# Altium footprint library Eduard.PcbLib: 54 footprints (part 3 of 4)
Each footprint in its own frame and in the unit in brackets; x right, y up, seen from the top. Pads: shape width x height; smd on the part's side, far side on the other; paste and mask are expansions set on the pad; w line width, h text height; cw(c..) or ccw(c..) is an arc to the next point about the centre after c.
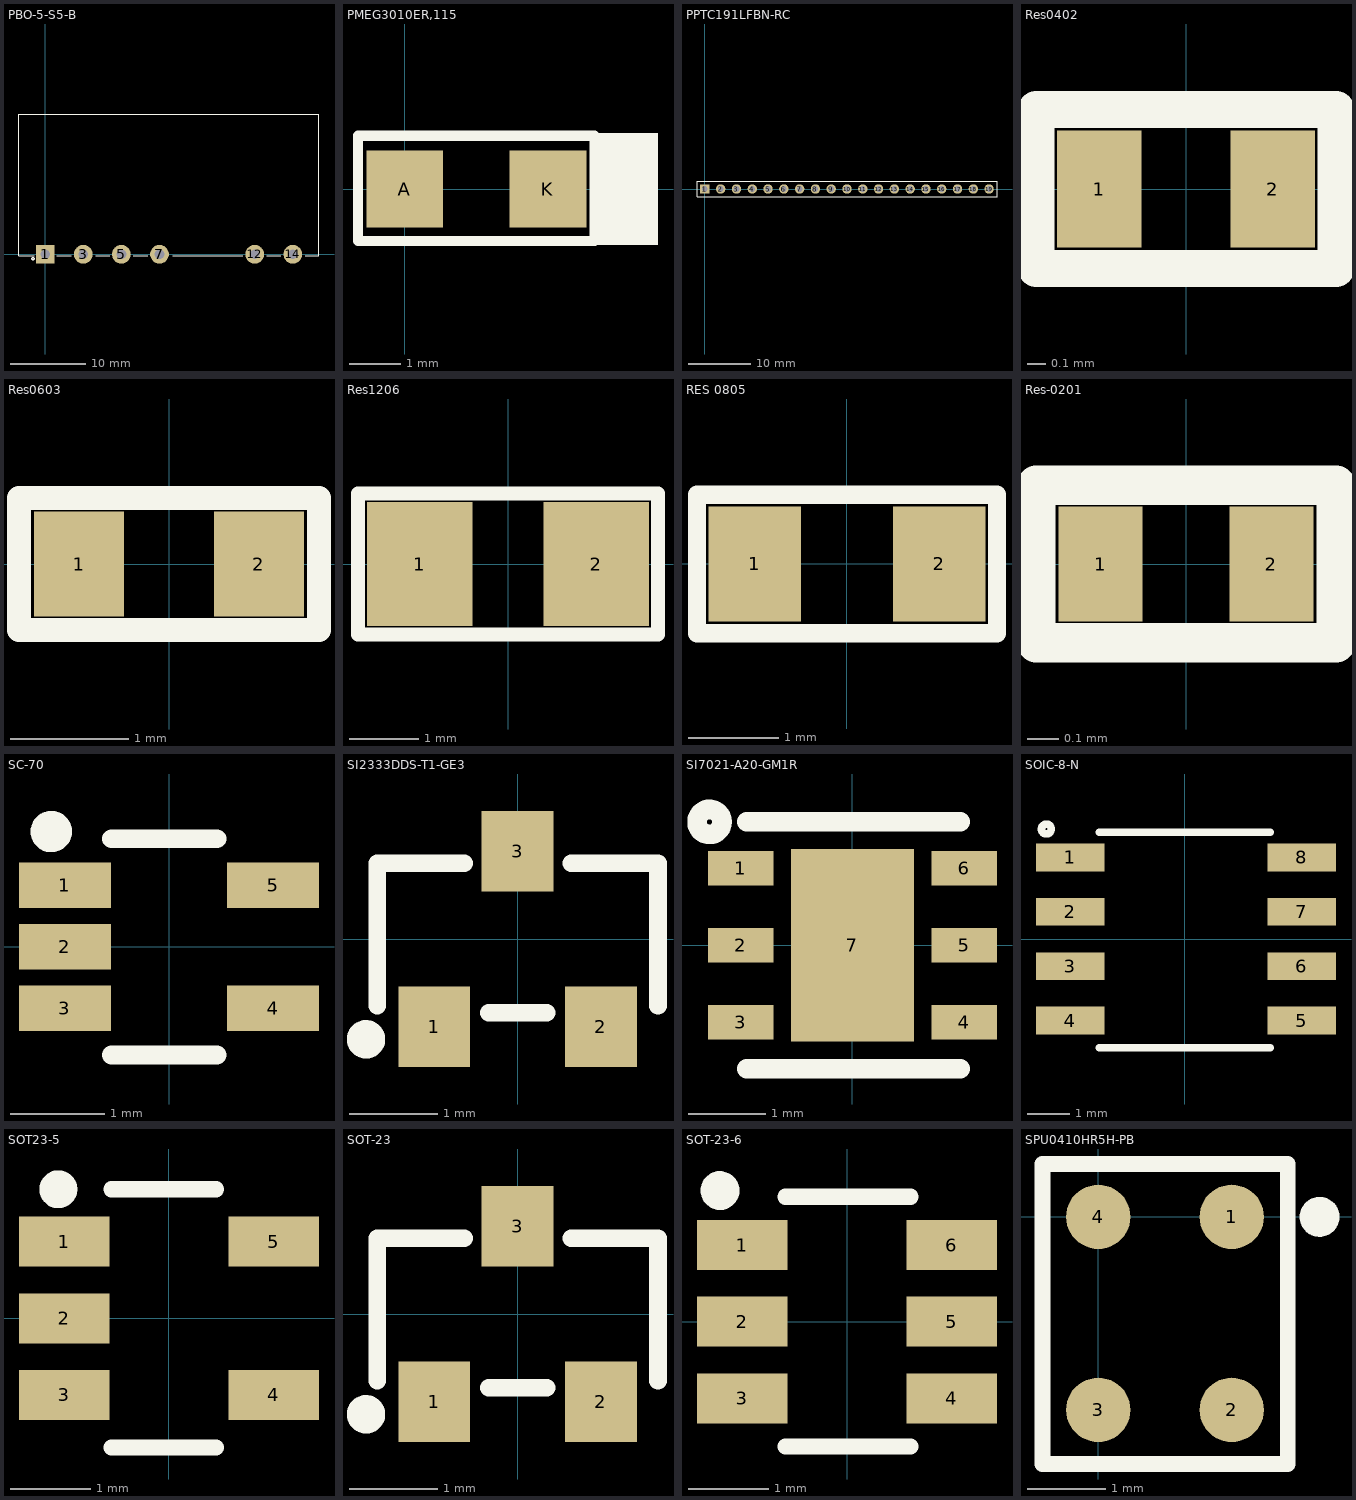
[diagram p2: the footprints below, top view; thin cyan lines are the x and y axes]

## PBO-5-S5-B [mm]
pads (6):
  rect 2.5x2.5 hole 1.3: 1(0,0)
  round 2.5 hole 1.3: 3(5.08,0) 5(10.16,0) 7(15.24,0) 12(27.94,0) 14(33.02,0)
Top Overlay:
  circle w0.2: c-1.626,-0.61 r0.152
  lines w0.127: -1.473,-0.203 -3.49,-0.203 -3.49,18.654 36.51,18.654 36.51,-0.203 34.696,-0.203 ; 1.549,-0.203 3.505,-0.203 ; 6.756,-0.203 8.636,-0.203 ; 11.76,-0.203 13.665,-0.203 ; 16.993,-0.203 26.345,-0.203 ; 29.566,-0.203 31.42,-0.203
3D body "CUI_PBO-5-S5-B.step": height 10.7, standoff -6.35, extent -3.494,-0.187 36.534,18.595

## PMEG3010ER,115 [mm] "DIODE SCHOTTKY 30V 1A SOD123W"
pads (2):
  rect 1.5x1.5 smd: A(0,0) K(2.8,0)
Top Overlay:
  region: 4.953,1.092 3.708,1.092 3.708,-1.092 4.953,-1.092
  lines w0.2: -0.914,-1.016 -0.914,1.041 3.708,1.041 3.708,-1.016 -0.914,-1.016
3D body "User Library-SOD123W.STEP": height 1.1, standoff -0.01, extent -0.603,-0.95 3.397,0.95

## PPTC191LFBN-RC [mm] "Connector Header 19 Position 2.54mm Trough Hole PCB Mount"
pads (19):
  rect 1.5x1.5 hole 0.9: 1(0,0)
  round 1.5 hole 0.9: 2(2.54,0) 3(5.08,0) 4(7.62,0) 5(10.16,0) 6(12.7,0) 7(15.24,0) 8(17.78,0) 9(20.32,0) 10(22.86,0) 11(25.4,0) 12(27.94,0) 13(30.48,0) 14(33.02,0) 15(35.56,0) 16(38.1,0) 17(40.64,0) 18(43.18,0) 19(45.72,0)
Top Overlay:
  lines w0.2: 37.465,1.27 37.677,1.27 ; -1.27,-1.27 46.99,-1.27 46.99,1.27 0.635,1.27 -1.27,1.27 -1.27,-1.27
3D body "female_header_a-bl254-eg-g19d.stp": height 8.5, standoff -3.2, extent -1.395,-1.237 47.115,1.263

## Res0402 [mil]
pads (2):
  rect 18x25 smd mask+4: 1(-18.5,0) 2(18.5,0)
Top Overlay:
  lines w7.87: -32,-17 32,-17 32,17 -32,17 -32,-17
3D body "User Library-RES_1005-0402.step": height 16.14, standoff 0, extent -22.63,-10.82 22.64,10.83

## Res0603 [mil]
pads (2):
  rect 30x35 smd: 1(-30,0) 2(30,0)
Top Overlay:
  lines w7.87: -50,-22 -50,22 50,22 50,-22 -50,-22
3D body "User Library-RESC1608X05N.step": height 17.76, standoff 0, extent -30.52,-16.74 30.51,16.73

## Res1206 [mil]
pads (2):
  rect 60x70 smd: 1(-50,0) 2(50,0)
Top Overlay:
  lines w7.87: -85,-40 85,-40 85,40 -85,40 -85,-40
3D body "User Library-1206 SMD Resistor.step": height 39.45, standoff 0, extent -62.99,-31.49 63,31.51

## RES 0805 [mil] "SMD 0805"
pads (2):
  rect 40x50 smd: 1(-40,0) 2(40,0)
Top Overlay:
  lines w7.87: -65,-30 -65,30 65,30 65,-30 -65,-30
3D body "User Library-CR2012-0805.STEP": height 23.62, standoff 0, extent -39.34,-24.75 39.4,24.46

## Res-0201 [mm]
pads (2):
  rect 0.27x0.37 smd: 1(-0.275,0) 2(0.275,0)
Top Overlay:
  lines w0.127: -0.483,-0.254 0.483,-0.254 0.483,0.254 -0.483,0.254 -0.483,-0.254
3D body "User Library-0201(0603M) Res.step": height 0.29, standoff -0.02, extent -0.305,-0.152 0.305,0.153

## SC-70 [mm] "SC-70"
height 1.3
pads (5):
  rect 0.97x0.48 smd: 1(-1.1,0.65) 2(-1.1,0) 3(-1.1,-0.65) 4(1.1,-0.65) 5(1.1,0.65)
Top Overlay:
  circle w0.254: c-1.245,1.219 r0.092
  lines w0.2: -0.61,-1.143 0.508,-1.143 ; -0.61,1.143 0.508,1.143
3D body "User Library-sot353.step": height 1, standoff 0, extent -1.15,-1.05 1.15,1.05

## SI2333DDS-T1-GE3 [mm] "MOSFET P-CH 12V 6A SOT23"
pads (3):
  rect 0.82x0.92 smd: 1(-0.95,-1) 2(0.95,-1) 3(0,1)
Top Overlay:
  circle w0.254: c-1.727,-1.143 r0.092
  lines w0.2: -1.6,-0.762 -1.6,0.864 -0.61,0.864 ; -0.33,-0.838 0.33,-0.838 ; 0.61,0.864 1.6,0.864 1.6,-0.762
3D body: height 0.25, standoff 0, extent -1.6,-0.711 1.626,0.838

## SI7021-A20-GM1R [mm]
pads (7):
  rect 0.85x0.45 smd: 1(-1.45,1) 2(-1.45,0) 3(-1.45,-1) 4(1.45,-1) 5(1.45,0) 6(1.45,1)
  rect 1.6x2.5 smd: 7(0,0)
Top Overlay:
  circle w0.254: c-1.854,1.6 r0.163
  lines w0.254: -1.372,-1.6 1.397,-1.6 ; -1.372,1.6 1.397,1.6
3D body "DFN6_3X3.step": height 1.22, standoff 0, extent -1.499,-1.499 1.499,1.499

## SOIC-8-N [mm]
height 1.778
pads (8):
  rect 1.6x0.65 smd: 1(-2.667,1.905) 2(-2.667,0.635) 3(-2.667,-0.635) 4(-2.667,-1.905) 5(2.733,-1.905) 6(2.733,-0.635) 7(2.733,0.635) 8(2.733,1.905)
Top Overlay:
  circle w0.178: c-3.226,2.565 r0.114
  lines w0.178: -1.994,-2.54 1.994,-2.54 ; -1.994,2.489 1.994,2.489
3D body "SO-8N.STEP": height 1.61, standoff -0.01, extent -3,-2.46 3,2.46

## SOT23-5 [mm] "SOT23-5 Package"
height 1.3
pads (5):
  rect 1.12x0.62 smd: 1(-1.3,0.95) 2(-1.3,0) 3(-1.3,-0.95) 4(1.3,-0.95) 5(1.3,0.95)
Top Overlay:
  circle w0.254: c-1.372,1.6 r0.108
  lines w0.2: -0.711,-1.6 0.584,-1.6 ; -0.711,1.6 0.584,1.6
3D body "User Library-SOT-23-5-1.STEP": height 1.09, standoff -0.01, extent -1.25,-1.5 1.25,1.5

## SOT-23 [mm]
pads (3):
  rect 0.82x0.92 smd: 1(-0.95,-1) 2(0.95,-1) 3(0,1)
Top Overlay:
  circle w0.254: c-1.727,-1.143 r0.092
  lines w0.2: -1.6,-0.762 -1.6,0.864 -0.61,0.864 ; -0.33,-0.838 0.33,-0.838 ; 0.61,0.864 1.6,0.864 1.6,-0.762
3D body "CircuitWorks-SOT-23.step": height 1.1, standoff 0, extent -1.5,-1.25 1.5,1.25

## SOT-23-6 [mm]
pads (6):
  rect 1.12x0.62 smd: 1(-1.3,0.95) 2(-1.3,0) 3(-1.3,-0.95) 4(1.3,-0.95) 5(1.3,0) 6(1.3,0.95)
Top Overlay:
  circle w0.254: c-1.575,1.626 r0.114
  lines w0.2: -0.762,-1.549 0.787,-1.549 ; -0.762,1.549 0.787,1.549
3D body "User Library-SOT23-6-2.step": height 1.42, standoff -0.03, extent -1.4,-1.45 1.4,1.45

## SPU0410HR5H-PB [mm]
pads (4):
  round 0.82 smd: 1(1.7,0) 2(1.7,-2.46) 3(0,-2.46) 4(0,0)
Top Overlay:
  circle w0.254: c2.819,0 r0.127
  lines w0.2: -0.711,-3.15 -0.711,0.674 2.413,0.674 2.413,-3.15 -0.711,-3.15
3D body "spu0410hr5h-pb.stp": height 1.03, standoff -0.07, extent -0.624,-3.112 2.326,0.648